# Altium schematic symbol library sch_esp.SchLib: 1 symbol
Pins are listed as number, name and electrical type; pins without a type are passive.

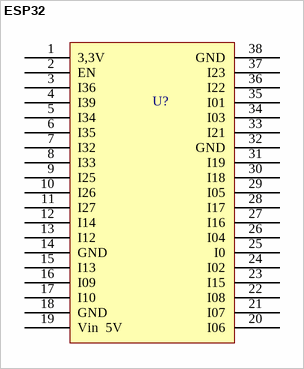
[diagram p0: symbol ESP32]

## ESP32
designator U?
footprint ESP32
pins: 1 3,3V, 2 EN, 3 I36, 4 I39, 5 I34, 6 I35, 7 I32, 8 I33, 9 I25, 10 I26, 11 I27, 12 I14, 13 I12, 14 GND, 15 I13, 16 I09, 17 I10, 18 GND, 19 Vin  5V, 20 I06, 21 I07, 22 I08, 23 I15, 24 I02, 25 I0, 26 I04, 27 I16, 28 I17, 29 I05, 30 I18, 31 I19, 32 GND, 33 I21, 34 I03, 35 I01, 36 I22, 37 I23, 38 GND